# Altium footprint library RPI-Router.PcbLib: 49 footprints (part 4 of 4)
Each footprint in its own frame and in the unit in brackets; x right, y up, seen from the top. Pads: shape width x height; smd on the part's side, far side on the other; paste and mask are expansions set on the pad; w line width, h text height; cw(c..) or ccw(c..) is an arc to the next point about the centre after c.
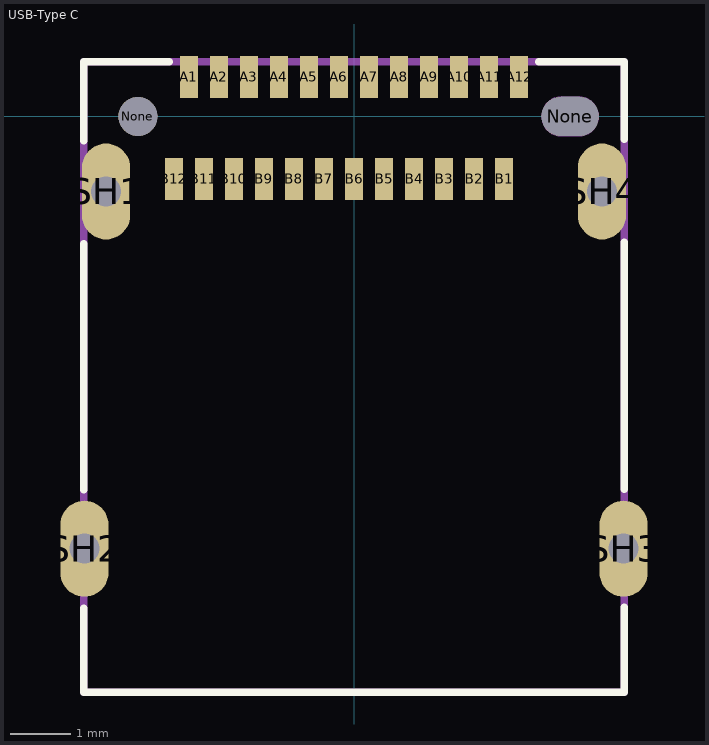
[diagram p3: the footprint, top view; thin cyan lines are the x and y axes]

## USB-Type C [mm]
pads (30):
  rect 0.3x0.7 smd: A1(-2.75,0.66) A2(-2.25,0.66) A3(-1.75,0.66) A4(-1.25,0.66) A5(-0.75,0.66) A6(-0.25,0.66) A7(0.25,0.66) A8(0.75,0.66) A9(1.25,0.66) A10(1.75,0.66) A11(2.25,0.66) A12(2.75,0.66) B1(2.5,-1.04) B2(2,-1.04) B3(1.5,-1.04) B4(1,-1.04) B5(0.5,-1.04) B6(0,-1.04) B7(-0.5,-1.04) B8(-1,-1.04) B9(-1.5,-1.04) B10(-2,-1.04) B11(-2.5,-1.04) B12(-3,-1.04)
  round 0.65 hole 0.65 unplated: None(-3.6,0)
  oval 0.95x0.65 hole 0.65 slot 0.95 at 0 deg unplated: None(3.6,0)
  oval 0.8x1.6 hole 0.5: SH1(-4.13,-1.25) SH2(-4.49,-7.2) SH3(4.49,-7.2) SH4(4.13,-1.25)
Top Overlay:
  lines w0.127: -4.5,-8.19 -4.5,-9.59 4.5,-9.59 4.5,-8.18 ; -4.5,-6.22 -4.5,-2.12 ; -4.5,-0.4 -4.5,0.91 -3.08,0.91 ; 3.08,0.91 4.5,0.91 4.5,-0.38 ; 4.5,-6.21 4.5,-2.1
Mechanical 1:
  lines w0: -4.74,-7.5 ccw(c-4.49,-7.5) -4.24,-7.5 -4.24,-6.9 ccw(c-4.49,-6.9) -4.74,-6.9 -4.74,-7.5 ; -4.38,-1.55 ccw(c-4.13,-1.55) -3.88,-1.55 -3.88,-0.95 ccw(c-4.13,-0.95) -4.38,-0.95 -4.38,-1.55 ; 3.45,-0.325 cw(c3.45,0) 3.45,0.325 3.75,0.325 cw(c3.75,0) 3.75,-0.325 3.45,-0.325 ; 3.88,-1.55 ccw(c4.13,-1.55) 4.38,-1.55 4.38,-0.95 ccw(c4.13,-0.95) 3.88,-0.95 3.88,-1.55 ; 4.24,-7.5 ccw(c4.49,-7.5) 4.74,-7.5 4.74,-6.9 ccw(c4.49,-6.9) 4.24,-6.9 4.24,-7.5
Mechanical 13:
  lines w0.127: -4.5,-9.59 -4.5,0.91 ; -4.5,-9.59 4.5,-9.59 ; -4.5,-9.59 -4.5,0.91 ; -4.5,-9.59 4.5,-9.59 ; -4.5,0.91 4.5,0.91 ; -4.5,0.91 4.5,0.91 ; 4.5,-9.59 4.5,0.91 ; 4.5,-9.59 4.5,0.91